# Altium schematic symbol library 2450AT07A0100001T.SchLib: 1 symbol
Pins are listed as number, name and electrical type; pins without a type are passive.

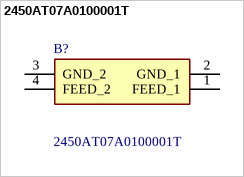
[diagram p0: symbol 2450AT07A0100001T]

## 2450AT07A0100001T
designator B?
RF ANT 2.4GHZ CHIP SOLDER SMD 2.44 GHz RF Chip Antenna HEIGHT-0.37; Manufacturer_Name: JOHANSON TECHNOLOGY; Geometry.Height: 0.37mm; Mouser Part Number: 609-2450AT07A0100001; Mouser Price/Stock: https://www.mouser.co.uk/ProductDetail/Johanson-Technology/2450AT07A0100001T?qs=jRuttqqUwMTp3VGKP6FABg%3D%3D; Manufacturer_Part_Number: 2450AT07A0100001T; Datasheet Link: https://www.johansontechnology.com/docs/4417/Antenna-2450AT07A0100001T.pdf
footprint 2450AT07A0100001T
pins: 1 FEED_1, 2 GND_1, 3 GND_2, 4 FEED_2